# Altium footprint library WR-MJ.PcbLib: 101 footprints (part 7 of 7)
Each footprint in its own frame and in the unit in brackets; x right, y up, seen from the top. Pads: shape width x height; smd on the part's side, far side on the other; paste and mask are expansions set on the pad; w line width, h text height; cw(c..) or ccw(c..) is an arc to the next point about the centre after c.
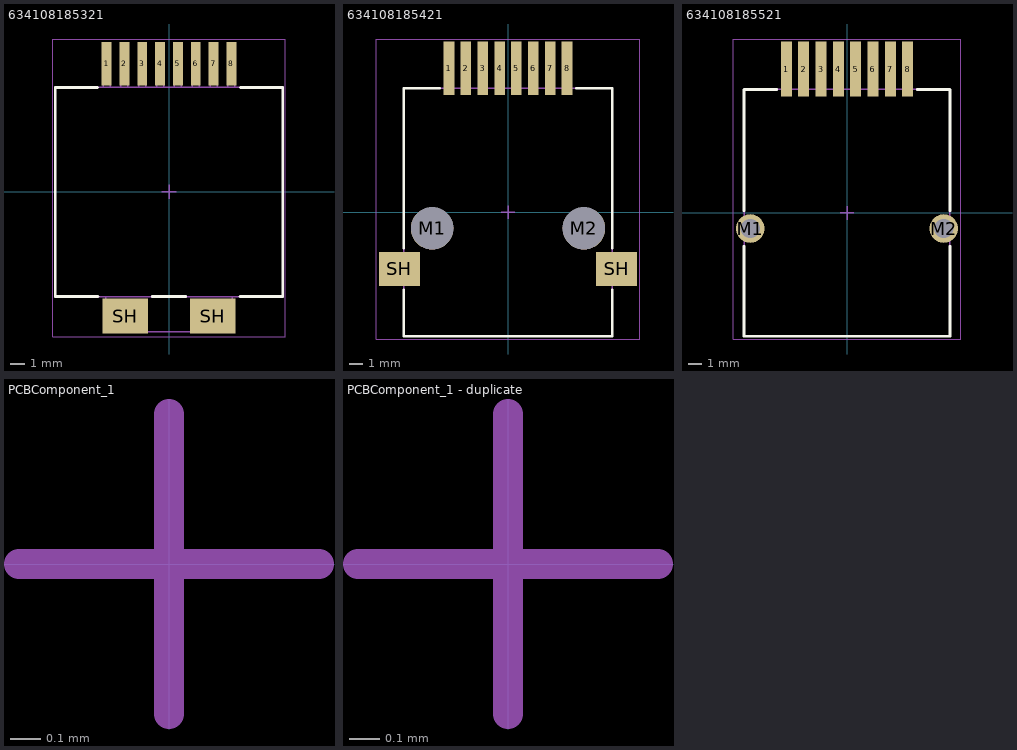
[diagram p6: the footprints below, top view; thin cyan lines are the x and y axes]

## 634108185321 [mm] "Modular Jack Vertical Shielded SMT  with Solder Tab 8P8C Top Entry"
height 13.3
pads (10):
  rect 0.7x3.1 smd: 1(-4.445,9.15) 2(-3.175,9.15) 3(-1.905,9.15) 4(-0.635,9.15) 5(0.635,9.15) 6(1.905,9.15) 7(3.175,9.15) 8(4.445,9.15)
  rect 3.25x2.5 smd: SH(-3.125,-8.85) SH(3.125,-8.85)
Top Overlay:
  lines w0.2: -5.1,7.45 -8.1,7.45 -8.1,-7.45 -5.05,-7.45 ; -1.2,-7.45 1.2,-7.45 ; 5.05,-7.45 8.1,-7.45 8.1,7.45 5.1,7.45
Top Assembly:
  lines w0.1: -4.695,7.45 -4.695,9.1 -4.195,9.1 -4.195,7.45 ; -4.5,-7.45 -4.5,-9.95 4.5,-9.95 4.5,-7.45 ; -3.425,7.45 -3.425,9.1 -2.925,9.1 -2.925,7.45 ; -2.155,7.45 -2.155,9.1 -1.655,9.1 -1.655,7.45 ; -0.885,7.45 -0.885,9.1 -0.385,9.1 -0.385,7.45 ; 0.385,7.45 0.385,9.1 0.885,9.1 0.885,7.45 ; 1.655,7.45 1.655,9.1 2.155,9.1 2.155,7.45 ; 2.925,7.45 2.925,9.1 3.425,9.1 3.425,7.45 ; 4.195,7.45 4.195,9.1 4.695,9.1 4.695,7.45 ; -8.1,-7.45 -8.1,7.45 8.1,7.45 8.1,-7.45 -8.1,-7.45
Top Designator:
  text ".Designator" at -3.647,-0.357 h1
Top Courtyard:
  lines w0.05: -8.3,-10.3 -8.3,10.9 8.3,10.9 8.3,-10.3 -8.3,-10.3
Top Component Center:
  lines w0.1: -0.5,0 0.5,0 ; 0,-0.5 0,0.5
3D body "634108185321.stp": height 13.48, standoff 0.02, extent -8.16,-9.95 8.16,9.107

## 634108185421 [mm] "Modular Jack Horizontal Shielded  SMT 8P8C Tab Down"
height 12
pads (12):
  rect 0.8x4 smd: 1(-4.445,10.85) 2(-3.175,10.85) 3(-1.905,10.85) 4(-0.635,10.85) 5(0.635,10.85) 6(1.905,10.85) 7(3.175,10.85) 8(4.445,10.85)
  round 3.2 hole 3.2 unplated: M1(-5.715,-1.22) M2(5.715,-1.22)
  rect 3.12x2.54 smd: SH(-8.175,-4.27) SH(8.175,-4.27)
Top Overlay:
  lines w0.2: -7.85,-5.85 -7.85,-9.35 7.85,-9.35 7.85,-5.85 ; -7.85,-2.69 -7.85,9.35 -5.15,9.35 ; 5.15,9.35 7.85,9.35 7.85,-2.69
Top Assembly:
  lines w0.1: -7.85,-5.07 -9.45,-5.07 -9.45,-3.47 -7.85,-3.47 ; -4.745,9.35 -4.745,11.35 -4.145,11.35 -4.145,9.35 ; -3.475,9.35 -3.475,11.35 -2.875,11.35 -2.875,9.35 ; -2.205,9.35 -2.205,11.35 -1.605,11.35 -1.605,9.35 ; -0.935,9.35 -0.935,11.35 -0.335,11.35 -0.335,9.35 ; 0.335,9.35 0.335,11.35 0.935,11.35 0.935,9.35 ; 1.605,9.35 1.605,11.35 2.205,11.35 2.205,9.35 ; 2.875,9.35 2.875,11.35 3.475,11.35 3.475,9.35 ; 4.145,9.35 4.145,11.35 4.745,11.35 4.745,9.35 ; 7.85,-5.07 9.45,-5.07 9.45,-3.47 7.85,-3.47 ; -7.85,-9.35 7.85,-9.35 7.85,9.35 -7.85,9.35 -7.85,-9.35
Top Designator:
  text ".Designator" at -3.647,-0.357 h1
Top Courtyard:
  lines w0.05: -9.935,-9.55 -9.935,13.05 9.935,13.05 9.935,-9.55 -9.935,-9.55
Top Component Center:
  lines w0.1: -0.5,0 0.5,0 ; 0,-0.5 0,0.5
3D body "634108185421.stp": height 11.85, standoff -2.67, extent -9.45,-9.35 9.45,11.35

## 634108185521 [mm] "Modular Jack SMT Horizontal  Plastic 8P8C Tab Down"
height 11.65
pads (10):
  rect 0.8x4 smd: 1(-4.445,10.55) 2(-3.175,10.55) 3(-1.905,10.55) 4(-0.635,10.55) 5(0.635,10.55) 6(1.905,10.55) 7(3.175,10.55) 8(4.445,10.55)
  round 2.1 hole 1.4: M1(-7.095,-1.15) M2(7.095,-1.15)
Top Overlay:
  lines w0.2: -7.55,-2.45 -7.55,-9.05 7.55,-9.05 7.55,-2.45 ; -7.55,0.15 -7.55,9.05 -5.15,9.05 ; 5.15,9.05 7.55,9.05 7.55,0.15
Top Assembly:
  lines w0.1: -4.745,9.05 -4.745,11.25 -4.145,11.25 -4.145,9.05 ; -3.475,9.05 -3.475,11.25 -2.875,11.25 -2.875,9.05 ; -2.205,9.05 -2.205,11.25 -1.605,11.25 -1.605,9.05 ; -0.935,9.05 -0.935,11.25 -0.335,11.25 -0.335,9.05 ; 0.335,9.05 0.335,11.25 0.935,11.25 0.935,9.05 ; 1.605,9.05 1.605,11.25 2.205,11.25 2.205,9.05 ; 2.875,9.05 2.875,11.25 3.475,11.25 3.475,9.05 ; 4.145,9.05 4.145,11.25 4.745,11.25 4.745,9.05 ; -7.55,-9.05 7.55,-9.05 7.55,9.05 -7.55,9.05 -7.55,-9.05
Top Designator:
  text ".Designator" at -3.647,-0.357 h1
Top Courtyard:
  lines w0.05: -8.345,-9.25 8.345,-9.25 8.345,12.75 -8.345,12.75 -8.345,-9.25
Top Component Center:
  lines w0.1: -0.5,0 0.5,0 ; 0,-0.5 0,0.5
3D body "634108185521.stp": height 11.7, standoff -1.8, extent -7.55,-9.05 7.55,11.25

## PCBComponent_1 [mm]
Top Designator:
  text ".Designator" at -3.647,-0.357 h1
Top Component Center:
  lines w0.1: -0.5,0 0.5,0 ; 0,-0.5 0,0.5

## PCBComponent_1 - duplicate [mm]
Top Designator:
  text ".Designator" at -3.647,-0.357 h1
Top Component Center:
  lines w0.1: -0.5,0 0.5,0 ; 0,-0.5 0,0.5